# Altium footprint library DfPlayer_board.PcbLib: 3 footprints
Each footprint in its own frame and in the unit in brackets; x right, y up, seen from the top. Pads: shape width x height; smd on the part's side, far side on the other; paste and mask are expansions set on the pad; w line width, h text height; cw(c..) or ccw(c..) is an arc to the next point about the centre after c.
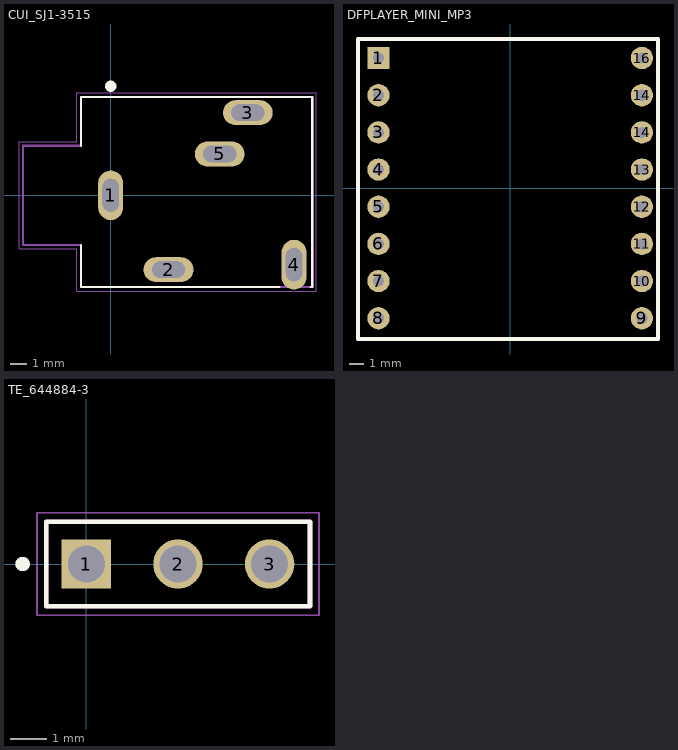
[diagram p0: the footprints below, top view; thin cyan lines are the x and y axes]

## CUI_SJ1-3515 [mm]
pads (5):
  oval 1.508x3.016 hole 1 slot 2 at 90 deg: 1(0,0) 4(11.1,-4.2)
  oval 3.016x1.508 hole 1 slot 2 at 0 deg: 2(3.5,-4.5) 3(8.3,5) 5(6.6,2.5)
Top Overlay:
  circle w0.34: c0,6.6 r0.17
  lines w0.127: -1.8,-3 -1.8,-5.55 10.2,-5.55 ; -1.8,3 -1.8,5.95 12.2,5.95 12.2,-5.55 12.1,-5.55
Mechanical 13:
  lines w0.127: -5.3,-3 -1.8,-3 -1.8,-5.55 12.2,-5.55 12.2,5.95 -1.8,5.95 -1.8,3 -5.3,3 -5.3,-3
Mechanical 15:
  lines w0.05: -5.55,-3.25 -2.05,-3.25 -2.05,-5.8 12.45,-5.8 12.45,6.2 -2.05,6.2 -2.05,3.25 -5.55,3.25 -5.55,-3.25
3D body "step_temp.STEP": height 5.87, standoff -3.13, extent -5.75,-5.5 11.75,6

## DFPLAYER_MINI_MP3 [mil] "HEADER for DfPlayer mini MP3"
pads (16):
  rect 60x60 hole 30: 1(-354.33,350)
  round 60 hole 30: 2(-354.33,250) 3(-354.33,150) 4(-354.33,50) 5(-354.33,-50) 6(-354.33,-150) 7(-354.33,-250) 8(-354.33,-350) 9(354.33,-350) 10(354.33,-250) 11(354.33,-150) 12(354.33,-50) 13(354.33,50) 14(354.33,150) 14(354.33,250) 16(354.33,350)
Top Overlay:
  lines w10: -409.45,-405.91 397.64,-405.91 397.64,401.18 -409.45,401.18 -409.45,-405.91
3D body "DFPlayer Mini Assem v1.step": height 314.96, standoff -125.98, extent -409.45,-514.17 409.45,409.45

## TE_644884-3 [mm]
pads (3):
  rect 1.37x1.37 / inner round 1.37 / far side rect 1.37x1.37 hole 1.02 mask+0.102: 1(0,0)
  round 1.37 hole 1.02 mask+0.102: 2(2.54,0) 3(5.08,0)
Top Overlay:
  circle w0.2: c-1.77,0 r0.1
  lines w0.127: -1.12,-1.17 -1.12,1.17 6.2,1.17 6.2,-1.17 -1.12,-1.17
Mechanical 13:
  circle w0.2: c-1.77,0 r0.1
  lines w0.127: -1.12,-1.17 -1.12,1.17 6.2,1.17 6.2,-1.17 ; -1.12,-1.17 6.2,-1.17 ; -1.12,-1.17 6.2,-1.17
Mechanical 15:
  lines w0.05: -1.37,-1.42 -1.37,1.42 6.45,1.42 6.45,-1.42 -1.37,-1.42
3D body "pin header female 2.54mm_0.1in.STEP": height 10.16, standoff -7.48, extent -1.27,-1.27 6.35,1.27